# Altium footprint library G4C_NANO.PcbLib: 1 footprints
Each footprint in its own frame and in the unit in brackets; x right, y up, seen from the top. Pads: shape width x height; smd on the part's side, far side on the other; paste and mask are expansions set on the pad; w line width, h text height; cw(c..) or ccw(c..) is an arc to the next point about the centre after c.
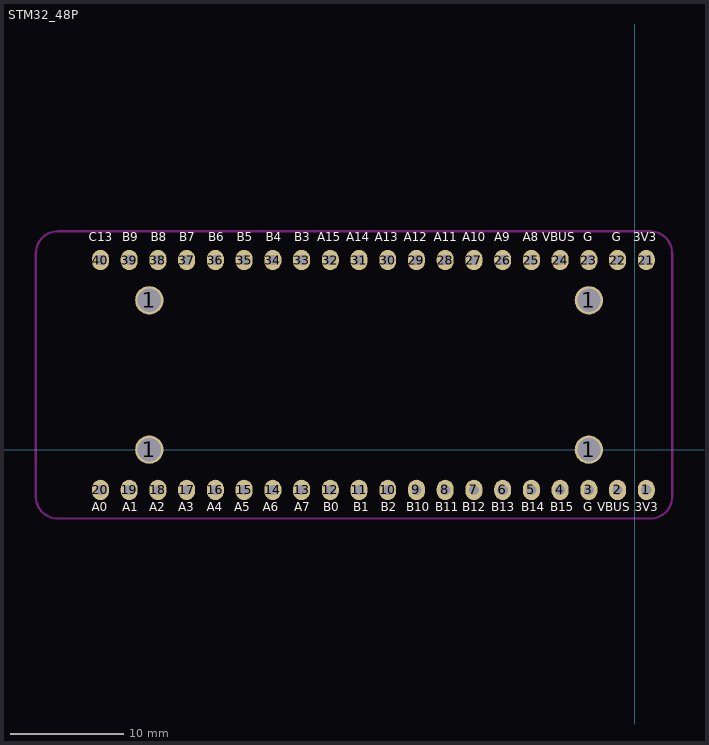
[diagram p0: the footprint, top view; thin cyan lines are the x and y axes]

## STM32_48P [mm]
pads (44):
  round 2.5 hole 2.05: 1(-42.926,0) 1(-42.926,13.208) 1(-4.064,0) 1(-4.064,13.208)
  oval 1.5x1.8 hole 0.9: 1(1.016,-3.556) 2(-1.524,-3.556) 3(-4.064,-3.556) 4(-6.604,-3.556) 5(-9.144,-3.556) 6(-11.684,-3.556) 7(-14.224,-3.556) 8(-16.764,-3.556) 9(-19.304,-3.556) 10(-21.844,-3.556) 11(-24.384,-3.556) 12(-26.924,-3.556) 13(-29.464,-3.556) 14(-32.004,-3.556) 15(-34.544,-3.556) 16(-37.084,-3.556) 17(-39.624,-3.556) 18(-42.164,-3.556) 19(-44.704,-3.556) 20(-47.244,-3.556) 21(1.016,16.764) 22(-1.524,16.764) 23(-4.064,16.764) 24(-6.604,16.764) 25(-9.144,16.764) 26(-11.684,16.764) 27(-14.224,16.764) 28(-16.764,16.764) 29(-19.304,16.764) 30(-21.844,16.764) 31(-24.384,16.764) 32(-26.924,16.764) 33(-29.464,16.764) 34(-32.004,16.764) 35(-34.544,16.764) 36(-37.084,16.764) 37(-39.624,16.764) 38(-42.164,16.764) 39(-44.704,16.764) 40(-47.244,16.764)
Top Overlay:
  text "A0" at -48.006,-5.716 h1.3
  text "A1" at -45.339,-5.73 h1.3
  text "A2" at -42.926,-5.73 h1.3
  text "A3" at -40.386,-5.715 h1.3
  text "A7" at -30.099,-5.73 h1.3
  text "A6" at -32.893,-5.716 h1.3
  text "A5" at -35.433,-5.716 h1.3
  text "A4" at -37.846,-5.73 h1.3
  text "B10" at -20.193,-5.716 h1.3
  text "B2" at -22.479,-5.73 h1.3
  text "B1" at -24.892,-5.73 h1.3
  text "B0" at -27.559,-5.716 h1.3
  text "B14" at -10.033,-5.73 h1.3
  text "B13" at -12.7,-5.715 h1.3
  text "B12" at -15.24,-5.73 h1.3
  text "B11" at -17.653,-5.73 h1.3
  text "3V3" at 0,-5.715 h1.3
  text "VBUS" at -3.302,-5.73 h1.3
  text "G" at -4.572,-5.716 h1.3
  text "B15" at -7.493,-5.716 h1.3
  text "VBUS" at -8.169,18.175 h1.3
  text "G" at -4.572,18.161 h1.3
  text "G" at -2.032,18.161 h1.3
  text "3V3" at -0.127,18.172 h1.3
  text "A11" at -17.78,18.172 h1.3
  text "A10" at -15.24,18.172 h1.3
  text "A9" at -12.446,18.172 h1.3
  text "A8" at -9.906,18.172 h1.3
  text "A15" at -28.067,18.172 h1.3
  text "A14" at -25.527,18.172 h1.3
  text "A13" at -22.987,18.172 h1.3
  text "A12" at -20.447,18.172 h1.3
  text "B6" at -37.719,18.172 h1.3
  text "B5" at -35.179,18.175 h1.3
  text "B4" at -32.639,18.175 h1.3
  text "B3" at -30.099,18.172 h1.3
  text "B7" at -40.259,18.175 h1.3
  text "B8" at -42.799,18.172 h1.3
  text "C13" at -48.26,18.161 h1.3
  text "B9" at -45.339,18.172 h1.3
Bottom Overlay:
  text "G" at -3.556,18.161 h1.3
  text "A9" at -10.922,18.172 h1.3
  text "B6" at -36.449,18.172 h1.3
  text "G" at -1.016,18.161 h1.3
  text "3V3" at 1.905,18.172 h1.3
  text "VBUS" at -5.08,18.175 h1.3
  text "A8" at -8.382,18.172 h1.3
  text "A11" at -15.875,18.172 h1.3
  text "A10" at -13.081,18.172 h1.3
  text "A12" at -18.288,18.172 h1.3
  text "A15" at -25.908,18.172 h1.3
  text "A13" at -20.828,18.172 h1.3
  text "B4" at -31.369,18.175 h1.3
  text "B3" at -28.829,18.172 h1.3
  text "B7" at -38.989,18.175 h1.3
  text "B8" at -41.529,18.172 h1.3
  text "C13" at -46.228,18.161 h1.3
  text "A14" at -23.368,18.172 h1.3
  text "B5" at -33.909,18.175 h1.3
  text "B9" at -44.069,18.172 h1.3
  text "A0" at -46.355,-5.716 h1.3
  text "A4" at -36.322,-5.73 h1.3
  text "B0" at -26.162,-5.716 h1.3
  text "A1" at -44.069,-5.73 h1.3
  text "A3" at -38.862,-5.715 h1.3
  text "A6" at -31.242,-5.716 h1.3
  text "A7" at -28.702,-5.73 h1.3
  text "B1" at -23.749,-5.73 h1.3
  text "B2" at -21.209,-5.73 h1.3
  text "B11" at -15.875,-5.73 h1.3
  text "B12" at -13.335,-5.73 h1.3
  text "B15" at -5.461,-5.716 h1.3
  text "G" at -3.556,-5.716 h1.3
  text "VBUS" at -0.213,-5.73 h1.3
  text "A5" at -33.782,-5.716 h1.3
  text "A2" at -41.402,-5.73 h1.3
  text "B13" at -10.668,-5.715 h1.3
  text "B10" at -18.288,-5.716 h1.3
  text "B14" at -8.128,-5.73 h1.3
Keep-Out Layer:
  lines w0.2: -52.959,-4.15 ccw(c-51.013,-4.15) -51.013,-6.096 1.356,-6.096 ccw(c1.356,-4.15) 3.302,-4.15 3.302,17.358 ccw(c1.356,17.358) 1.356,19.304 -51.013,19.304 ccw(c-51.013,17.358) -52.959,17.358 -52.959,-4.15